# EAGLE library part TXU0104 (library C3_SCOUT_REVC)
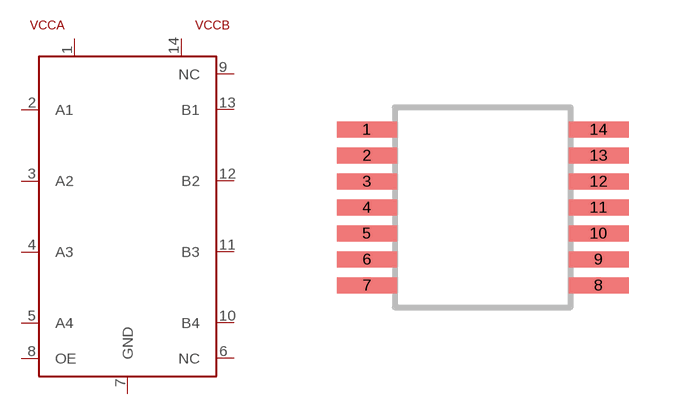
[diagram p3: symbol with the pads of TSSOP14-0.65; footprint TSSOP14-0.65]

Designator prefix U

## TXU0104  [TSSOP14-0.65]
1  VCCA  pwr
2  A1  in
3  A2  in
4  A3  in
5  A4  in
6  NC  nc
7  GND  pwr
8  OE  in
9  NC  nc
10  B4  hiz
11  B3  hiz
12  B2  hiz
13  B1  hiz
14  VCCB  pwr

## Footprint TSSOP14-0.65 (pad centres in mm)
smd 1.5 x 0.4: 1 -2.9,1.95; 2 -2.9,1.3; 3 -2.9,0.65; 4 -2.9,0; 5 -2.9,-0.65; 6 -2.9,-1.3; 7 -2.9,-1.95; 8 2.9,-1.95; 9 2.9,-1.3; 10 2.9,-0.65; 11 2.9,0; 12 2.9,0.65; 13 2.9,1.3; 14 2.9,1.95